# Altium schematic symbol library INA241A3IDDFR.SchLib: 1 symbol
Pins are listed as number, name and electrical type; pins without a type are passive.

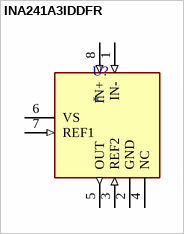
[diagram p0: symbol INA241A3IDDFR]

## INA241A3IDDFR
designator U?
-5-V to 110-V bidirectional ultraprecise current sense amplifier with enhanced PWM rejection; MF: Texas Instruments; MP: INA241A3IDDFR; Package: None; Price: None; Check_prices: https://www.snapeda.com/parts/INA241A3IDDFR/Texas+Instruments/view-part/?ref=eda; Value: *; SnapEDA_Link: https://www.snapeda.com/parts/INA241A3IDDFR/Texas+Instruments/view-part/?ref=snap; Availability: In Stock; Purchase-URL: https://pricing.snapeda.com/search?q=INA241A3IDDFR&ref=eda
footprint SOT65P280X110-8N
pins: 1 IN- (in), 2 GND (power), 3 REF2 (in), 4 NC, 5 OUT (out), 6 VS (power), 7 REF1 (in), 8 IN+ (in)